# Altium schematic symbol library Schematic_Libraries.SchLib: 57 symbols
Pins are listed as number, name and electrical type; pins without a type are passive.

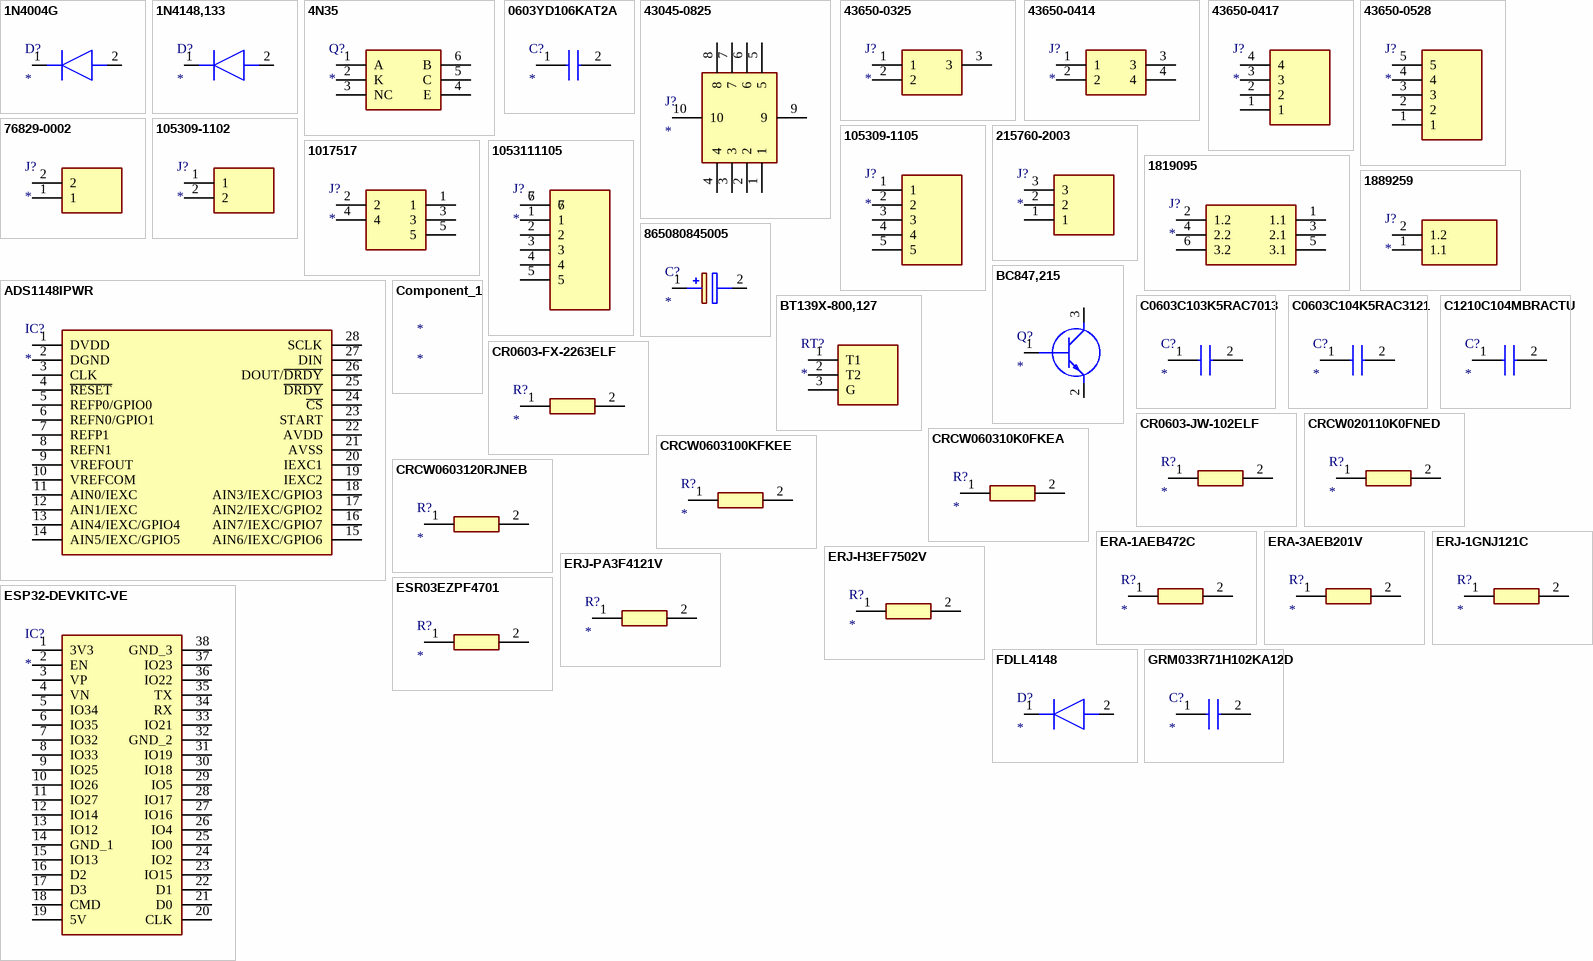
[diagram p0: symbols 1N4004G to GRM033R71H102KA12D]

## 1N4004G
designator D?
Diode; Manufacturer_Name: onsemi; Manufacturer_Part_Number: 1N4004G; Datasheet Link: https://www.onsemi.com/pub/Collateral/1N4001-D.PDF; Mouser Part Number: 863-1N4004G; Mouser Price/Stock: https://www.mouser.co.uk/ProductDetail/onsemi/1N4004G?qs=y2kkmE52mdNg%252Biqv0rMpBA%3D%3D; Arrow Part Number: 1N4004G; Arrow Price/Stock: https://www.arrow.com/en/products/1n4004g/on-semiconductor?region=europe
footprint DIOAD1405W86L465D235
pins: 1 K, 2 A

## 1N4148,133
designator D?
Diode; Manufacturer_Name: Nexperia; Manufacturer_Part_Number: 1N4148,133; Datasheet Link: https://assets.nexperia.com/documents/data-sheet/1N4148_1N4448.pdf; Mouser Part Number: 771-1N4148,133; Mouser Price/Stock: https://www.mouser.co.uk/ProductDetail/Nexperia/1N4148133?qs=elmhQ6eFu7hy8ApvpFxPZg%3D%3D; Arrow Part Number: 1N4148,133; Arrow Price/Stock: https://www.arrow.com/en/products/1n4148133/nxp-semiconductors
footprint DIOAD1165W56L425D185
pins: 1 K, 2 A

## 4N35
designator Q?
Transistor; Manufacturer_Name: Isocom; Manufacturer_Part_Number: 4N35; Datasheet Link: http://uk.rs-online.com/web/p/products/597302; Height: 4.5mm; Arrow Part Number: 4N35; Arrow Price/Stock: https://www.arrow.com/en/products/4n35/isocom?region=nac
footprint DIP762W50P254L712H450Q6N
pins: 1 A, 2 K, 3 NC, 4 E, 5 C, 6 B

## 0603YD106KAT2A
designator C?
Capacitor; Manufacturer_Name: Kyocera AVX; Manufacturer_Part_Number: 0603YD106KAT2A; Datasheet Link: https://www.mouser.at/datasheet/2/40/cx5r-776519.pdf; Height: 1.02mm; Mouser Part Number: 581-0603YD106KAT2A; Mouser Price/Stock: https://www.mouser.co.uk/ProductDetail/KYOCERA-AVX/0603YD106KAT2A?qs=%252BdQmOuGyFcHR%252BKJjw6cgxw%3D%3D
footprint CAPC1608X102N
pins: 1, 2

## 43045-0825
designator J?
Connector; Manufacturer_Name: Molex; Manufacturer_Part_Number: 43045-0825; Datasheet Link: https://www.molex.com/pdm_docs/sd/430450224_sd.pdf; Height: 9.91mm; Mouser Part Number: 538-43045-0825; Mouser Price/Stock: https://www.mouser.co.uk/ProductDetail/Molex/43045-0825?qs=s2x6KbZi%252BF4OgdQTNWCVlQ%3D%3D
footprint 43045-08YY_242526
pins: 1, 2, 3, 4, 5, 6, 7, 8, 9, 10

## 43650-0325
designator J?
Connector; Manufacturer_Name: Molex; Manufacturer_Part_Number: 43650-0325; Datasheet Link: https://www.molex.com/pdm_docs/sd/436500224_sd.pdf; Height: 9.9mm; Mouser Part Number: 538-43650-0325; Mouser Price/Stock: https://www.mouser.co.uk/ProductDetail/Molex/43650-0325?qs=o4r9IV%252BgZWMlLwul08NtEw%3D%3D
footprint 43650-03YY_242526
pins: 1, 2, 3

## 43650-0414
designator J?
Connector; Manufacturer_Name: Molex; Manufacturer_Part_Number: 43650-0414; Datasheet Link: https://www.molex.com/pdm_docs/sd/436500212_sd.pdf; Height: 5.57mm; Mouser Part Number: 538-43650-0414; Mouser Price/Stock: https://www.mouser.co.uk/ProductDetail/Molex/43650-0414?qs=R7%2FZKp6KZ2bFoNEw1nfqtQ%3D%3D
footprint 43650-04(12,13,14)
pins: 1, 2, 3, 4

## 43650-0417
designator J?
Connector; Manufacturer_Name: Molex; Manufacturer_Part_Number: 43650-0417; Datasheet Link: https://www.molex.com/pdm_docs/sd/436500215_sd.pdf; Height: 9.9mm; Mouser Part Number: 538-43650-0417; Mouser Price/Stock: https://www.mouser.co.uk/ProductDetail/Molex/43650-0417?qs=HSGlLeu24BPtyyP0ZyQMkg%3D%3D
footprint 43650-04YY_151617
pins: 1, 2, 3, 4

## 43650-0528
designator J?
Connector; Manufacturer_Name: Molex; Manufacturer_Part_Number: 43650-0528; Datasheet Link: https://www.molex.com/pdm_docs/sd/436500227_sd.pdf; Height: 9.9mm; Mouser Part Number: 538-43650-0528; Mouser Price/Stock: https://www.mouser.co.uk/ProductDetail/Molex/43650-0528?qs=jGANiKWBgcigkrrk7PUfPg%3D%3D
footprint 43650-05YY_272829
pins: 1, 2, 3, 4, 5

## 76829-0002
designator J?
Connector; Manufacturer_Name: Molex; Manufacturer_Part_Number: 76829-0002; Datasheet Link: https://www.molex.com/pdm_docs/sd/768290002_sd.pdf; Height: 14.8mm; Mouser Part Number: 538-76829-0002; Mouser Price/Stock: https://www.mouser.co.uk/ProductDetail/Molex/76829-0002?qs=KpdAywxU013zSYApMD1zRg%3D%3D
footprint 768290002
pins: 1, 2

## 105309-1102
designator J?
Connector; Manufacturer_Name: Molex; Manufacturer_Part_Number: 105309-1102; Datasheet Link: http://www.molex.com/pdm_docs/sd/1053091102_sd.pdf; Height: 10.51mm; Mouser Part Number: 538-105309-1102; Mouser Price/Stock: https://www.mouser.co.uk/ProductDetail/Molex/105309-1102?qs=5aG0NVq1C4zzTOxEjLJqtg%3D%3D
footprint 1053091102
pins: 1, 2

## 105309-1105
designator J?
Connector; Manufacturer_Name: Molex; Manufacturer_Part_Number: 105309-1105; Datasheet Link: https://componentsearchengine.com/Datasheets/1/105309-1105.pdf; Height: 10.71mm; Mouser Part Number: 538-105309-1105; Mouser Price/Stock: https://www.mouser.co.uk/ProductDetail/Molex/105309-1105?qs=5aG0NVq1C4xeVnIB0kAHNg%3D%3D
footprint 1053091105
pins: 1, 2, 3, 4, 5

## 215760-2003
designator J?
Connector; Manufacturer_Name: Molex; Manufacturer_Part_Number: 215760-2003; Datasheet Link: https://www.molex.com/pdm_docs/sd/2157601002_sd.pdf; Height: 5.87mm; Mouser Part Number: 538-215760-2003; Mouser Price/Stock: https://www.mouser.co.uk/ProductDetail/Molex/215760-2003?qs=pBJMDPsKWf09BQNa5vunHw%3D%3D
footprint 215760-YY03
pins: 1, 2, 3

## 1017517
designator J?
Connector; Manufacturer_Name: Phoenix Contact; Manufacturer_Part_Number: 1017517; Datasheet Link: http://www.phoenixcontact.com/de/produkte/1017517/pdf; Height: 23.6mm; Mouser Part Number: 651-1017517; Mouser Price/Stock: https://www.mouser.co.uk/ProductDetail/Phoenix-Contact/1017517?qs=F5EMLAvA7IBc9r3IKuJwsQ%3D%3D; Arrow Part Number: 1017517; Arrow Price/Stock: https://www.arrow.com/en/products/1017517/phoenix-contact?region=nac
footprint 1017517
pins: 1, 2, 3, 4, 5

## 1819095
designator J?
Connector; Manufacturer_Name: Phoenix Contact; Manufacturer_Part_Number: 1819095; Datasheet Link: http://www.phoenixcontact.com/gb/produkte/1819095; Height: 34.2mm; Mouser Part Number: 651-1819095; Mouser Price/Stock: https://www.mouser.co.uk/ProductDetail/Phoenix-Contact/1819095?qs=2WS7V4AoKFp%2FrLOug%252BjY6w%3D%3D; Arrow Part Number: 1819095; Arrow Price/Stock: https://www.arrow.com/en/products/1819095/phoenix-contact
footprint 1819095
pins: 1 1.1, 2 1.2, 3 2.1, 4 2.2, 5 3.1, 6 3.2

## 1889259
designator J?
Connector; Manufacturer_Name: Phoenix Contact; Manufacturer_Part_Number: 1889259; Datasheet Link: https://datasheet.datasheetarchive.com/originals/distributors/SFDatasheet-2/sf-00055982.pdf; Height: 12.9mm; Mouser Part Number: 651-1889259; Mouser Price/Stock: https://www.mouser.co.uk/ProductDetail/Phoenix-Contact/1889259?qs=DAHzmYU9cu0zVWy4jZehMg%3D%3D; Arrow Part Number: 1889259; Arrow Price/Stock: https://www.arrow.com/en/products/1889259/phoenix-contact?region=nac
footprint 1889259
pins: 1 1.1, 2 1.2

## 1053111105
designator J?
Connector; Manufacturer_Name: Molex; Manufacturer_Part_Number: 1053111105; Datasheet Link: https://www.molex.com/pdm_docs/sd/1053111102_sd.pdf; Height: 10.51mm
footprint 105311??05
pins: 1, 2, 3, 4, 5, 6, 7

## 865080845005
designator C?
Capacitor Polarised; Manufacturer_Name: Wurth Elektronik; Manufacturer_Part_Number: 865080845005; Datasheet Link: https://componentsearchengine.com/Datasheets/2/865080845005.pdf; Height: 7.7mm; Mouser Part Number: 710-865080845005; Mouser Price/Stock: https://www.mouser.co.uk/ProductDetail/Wurth-Elektronik/865080845005?qs=amGC7iS6iy8sIRVXlptWnA%3D%3D
footprint CAPAE660X770N
pins: 1 +, 2 -

## ADS1148IPWR
designator IC?
Integrated Circuit; Manufacturer_Name: Texas Instruments; Manufacturer_Part_Number: ADS1148IPWR; Datasheet Link: https://www.ti.com/lit/ds/symlink/ads1148.pdf?ts=1619426241250&ref_url=https%253A%252F%252Fwww.ti.com%252Fstore%252Fti%252Fen%252Fp%252Fproduct%252F%253Fp%253DADS1148IPWR; Height: 1.2mm; Mouser Part Number: 595-ADS1148IPWR; Mouser Price/Stock: https://www.mouser.co.uk/ProductDetail/Texas-Instruments/ADS1148IPWR?qs=J7dbQ%252BTwiys0xPZTIiVXvA%3D%3D; Arrow Part Number: ADS1148IPWR; Arrow Price/Stock: https://www.arrow.com/en/products/ads1148ipwr/texas-instruments
footprint SOP65P640X120-28N
pins: 1 DVDD, 2 DGND, 3 CLK, 4 ~{RESET}, 5 REFP0/GPIO0, 6 REFN0/GPIO1, 7 REFP1, 8 REFN1, 9 VREFOUT, 10 VREFCOM, 11 AIN0/IEXC, 12 AIN1/IEXC, 13 AIN4/IEXC/GPIO4, 14 AIN5/IEXC/GPIO5, 15 AIN6/IEXC/GPIO6, 16 AIN7/IEXC/GPIO7, 17 AIN2/IEXC/GPIO2, 18 AIN3/IEXC/GPIO3, 19 IEXC2, 20 IEXC1, 21 AVSS, 22 AVDD, 23 START, 24 ~{CS}, 25 ~{DRDY}, 26 DOUT/~{DRDY}, 27 DIN, 28 SCLK

## BC847,215
designator Q?
Transistor BJT NPN; Manufacturer_Name: Nexperia; Manufacturer_Part_Number: BC847,215; Datasheet Link: https://assets.nexperia.com/documents/data-sheet/BC847_SER.pdf; Height: 1.1mm; Mouser Part Number: 771-BC847215; Mouser Price/Stock: https://www.mouser.co.uk/ProductDetail/Nexperia/BC847215?qs=me8TqzrmIYWROhdFmDauyQ%3D%3D; Arrow Part Number: BC847,215; Arrow Price/Stock: https://www.arrow.com/en/products/bc847215/nexperia?region=europe
footprint BC847215
pins: 1 B, 2 E, 3 C

## BT139X-800,127
designator RT?
Thermistor; Manufacturer_Name: WeEn Semiconductors; Manufacturer_Part_Number: BT139X-800,127; Datasheet Link: https://www.mouser.co.uk/datasheet/2/848/BT139X-800-1104332.pdf; Height: 4.6mm; Mouser Part Number: 771-BT139X-800127; Mouser Price/Stock: https://www.mouser.co.uk/ProductDetail/WeEn-Semiconductors/BT139X-800127?qs=me8TqzrmIYUpGZ3R%252BN0ixA%3D%3D; Arrow Part Number: BT139X-800,127; Arrow Price/Stock: https://www.arrow.com/en/products/bt139x-800127/ween-semiconductors?utm_currency=USD&region=europe
footprint TO254P460X1000X1910-3P
pins: 1 T1, 2 T2, 3 G

## C0603C103K5RAC7013
designator C?
Capacitor; Manufacturer_Name: KEMET; Manufacturer_Part_Number: C0603C103K5RAC7013; Datasheet Link: https://www.mouser.es/datasheet/2/212/KEM_C1002_X7R_SMD-1102033.pdf; Height: 0.87mm; Mouser Part Number: 80-C0603C103K5RC7013; Mouser Price/Stock: https://www.mouser.co.uk/ProductDetail/KEMET/C0603C103K5RAC7013?qs=rxL5I1UrDR%2FDLdVRYcoJRw%3D%3D; Arrow Part Number: C0603C103K5RAC7013; Arrow Price/Stock: https://www.arrow.com/en/products/c0603c103k5rac7013/kemet-corporation
footprint CAPC1608X87N
pins: 1, 2

## C0603C104K5RAC3121
designator C?
Capacitor; Manufacturer_Name: KEMET; Manufacturer_Part_Number: C0603C104K5RAC3121; Datasheet Link: https://mouser.componentsearchengine.com/Datasheets/1/C0603C104K5RAC3121.pdf; Height: 0.95mm; Mouser Part Number: 80-C603C104K5RAC3121; Mouser Price/Stock: https://www.mouser.co.uk/ProductDetail/KEMET/C0603C104K5RAC3121?qs=oBCMsStVSxe1EkGyoyETtg%3D%3D; Arrow Part Number: C0603C104K5RAC3121; Arrow Price/Stock: https://www.arrow.com/en/products/c0603c104k5rac3121/kemet-corporation?region=nac
footprint CAPC1608X95N
pins: 1, 2

## C1210C104MBRACTU
designator C?
Capacitor; Manufacturer_Name: KEMET; Manufacturer_Part_Number: C1210C104MBRACTU; Datasheet Link: https://content.kemet.com/datasheets/KEM_C1010_X7R_HV_SMD.pdf; Mouser Part Number: 80-C1210C104MBR; Mouser Price/Stock: https://www.mouser.co.uk/ProductDetail/KEMET/C1210C104MBRACTU?qs=%2FukktrhNKsZSienwvzOPlQ%3D%3D; Arrow Part Number: C1210C104MBRACTU; Arrow Price/Stock: https://www.arrow.com/en/products/c1210c104mbractu/kemet-corporation?region=nac
footprint C1210
pins: 1, 2

## Component_1
designator *

## CR0603-FX-2263ELF
designator R?
Resistor; Manufacturer_Name: Bourns; Manufacturer_Part_Number: CR0603-FX-2263ELF; Datasheet Link: https://www.bourns.com/pdfs/chpreztr.pdf; Height: 0.55mm; Mouser Part Number: 652-CR0603FX-2263ELF; Mouser Price/Stock: https://www.mouser.co.uk/ProductDetail/Bourns/CR0603-FX-2263ELF?qs=zx2075yZkZKb3bFqHcdfsQ%3D%3D
footprint RESC1608X55N
pins: 1, 2

## CR0603-JW-102ELF
designator R?
Resistor; Manufacturer_Name: Bourns; Manufacturer_Part_Number: CR0603-JW-102ELF; Datasheet Link: https://www.bourns.com/pdfs/chpreztr.pdf; Height: 0.55mm; Mouser Part Number: 652-CR0603-JW-102ELF; Mouser Price/Stock: https://www.mouser.co.uk/ProductDetail/Bourns/CR0603-JW-102ELF?qs=rcPhh2wube3o3zlmFZCUPg%3D%3D; Arrow Part Number: CR0603-JW-102ELF; Arrow Price/Stock: https://www.arrow.com/en/products/cr0603-jw-102elf/bourns?region=nac
footprint RESC1608X55N
pins: 1, 2

## CRCW020110K0FNED
designator R?
Resistor; Manufacturer_Name: Vishay; Manufacturer_Part_Number: CRCW020110K0FNED; Datasheet Link: http://www.vishay.com/docs/20035/dcrcwe3.pdf; Height: 0.28mm; Mouser Part Number: 71-CRCW0201-10K; Mouser Price/Stock: https://www.mouser.co.uk/ProductDetail/Vishay-Dale/CRCW020110K0FNED?qs=IQLUlsvFoXuh7T4rhkKYcQ%3D%3D; Arrow Part Number: CRCW020110K0FNED; Arrow Price/Stock: https://www.arrow.com/en/products/crcw020110k0fned/vishay?utm_currency=USD&region=nac
footprint RESC0603X28N
pins: 1, 2

## CRCW060310K0FKEA
designator R?
Resistor; Manufacturer_Name: Vishay; Manufacturer_Part_Number: CRCW060310K0FKEA; Datasheet Link: http://www.vishay.com/docs/20035/dcrcwe3.pdf; Height: 0.5mm; Mouser Part Number: 71-CRCW0603-10K-E3; Mouser Price/Stock: https://www.mouser.co.uk/ProductDetail/Vishay-Dale/CRCW060310K0FKEA?qs=pAO1Z172M84BVnhDjtnsoQ%3D%3D; Arrow Part Number: CRCW060310K0FKEA; Arrow Price/Stock: https://www.arrow.com/en/products/crcw060310k0fkea/vishay?region=nac
footprint RESC1608X50N
pins: 1, 2

## CRCW0603100KFKEE
designator R?
Resistor; Manufacturer_Name: Vishay; Manufacturer_Part_Number: CRCW0603100KFKEE; Datasheet Link: http://www.vishay.com/docs/20035/dcrcwe3.pdf; Height: 0.5mm; Mouser Part Number: 71-CRCW0603100KFKEE; Mouser Price/Stock: https://www.mouser.co.uk/ProductDetail/Vishay-Dale/CRCW0603100KFKEE?qs=%252B6g0mu59x7I1D%252BO0qMg%252Bjg%3D%3D; Arrow Part Number: CRCW0603100KFKEE; Arrow Price/Stock: https://www.arrow.com/en/products/crcw0603100kfkee/vishay?utm_currency=USD&region=nac
footprint RESC1608X50N
pins: 1, 2

## CRCW0603120RJNEB
designator R?
Resistor; Manufacturer_Name: Vishay; Manufacturer_Part_Number: CRCW0603120RJNEB; Datasheet Link: http://www.vishay.com/docs/20035/dcrcwe3.pdf; Height: 0.5mm; Mouser Part Number: 71-CRCW0603120RJNEB; Mouser Price/Stock: https://www.mouser.co.uk/ProductDetail/Vishay-Dale/CRCW0603120RJNEB?qs=dDPdN3Fizmtr%252Bd8kOFNKdA%3D%3D; Arrow Part Number: CRCW0603120RJNEB; Arrow Price/Stock: https://www.arrow.com/en/products/crcw0603120rjneb/vishay?region=nac
footprint RESC1608X50N
pins: 1, 2

## ERA-1AEB472C
designator R?
Resistor; Manufacturer_Name: Panasonic; Manufacturer_Part_Number: ERA-1AEB472C; Datasheet Link: http://industrial.panasonic.com/cdbs/www-data/pdf/RDM0000/AOA0000C307.pdf; Height: 0.26mm; Mouser Part Number: 667-ERA-1AEB472C; Mouser Price/Stock: https://www.mouser.co.uk/ProductDetail/Panasonic/ERA-1AEB472C?qs=kmv%2FWw32SUOyPB5pGQQEuA%3D%3D; Arrow Part Number: ERA-1AEB472C; Arrow Price/Stock: https://www.arrow.com/en/products/era-1aeb472c/panasonic
footprint ERA1A_(0201)
pins: 1, 2

## ERA-3AEB201V
designator R?
Resistor; Manufacturer_Name: Panasonic; Manufacturer_Part_Number: ERA-3AEB201V; Datasheet Link: https://industrial.panasonic.com/cdbs/www-data/pdf/RDM0000/AOA0000C307.pdf; Height: 0.55mm; Mouser Part Number: 667-ERA-3AEB201V; Mouser Price/Stock: https://www.mouser.co.uk/ProductDetail/Panasonic/ERA-3AEB201V?qs=XhO1W%252B5LdJ8wKRfVTWbMaA%3D%3D; Arrow Part Number: ERA-3AEB201V; Arrow Price/Stock: https://www.arrow.com/en/products/era-3aeb201v/panasonic
footprint ERA3AEB101V
pins: 1, 2

## ERJ-1GNJ121C
designator R?
Resistor; Manufacturer_Name: Panasonic; Manufacturer_Part_Number: ERJ-1GNJ121C; Datasheet Link: https://industrial.panasonic.com/cdbs/www-data/pdf/RDA0000/AOA0000C301.pdf; Height: 0.26mm; Mouser Part Number: 667-ERJ-1GNJ121C; Mouser Price/Stock: https://www.mouser.com/Search/Refine.aspx?Keyword=667-ERJ-1GNJ121C
footprint ERJ1G_(0201)
pins: 1, 2

## ERJ-H3EF7502V
designator R?
Resistor; Manufacturer_Name: Panasonic; Manufacturer_Part_Number: ERJ-H3EF7502V; Datasheet Link: http://industrial.panasonic.com/cdbs/www-data/pdf/RDQ0000/ast-ind-151033.pdf
footprint ERJH3
pins: 1, 2

## ERJ-PA3F4121V
designator R?
Resistor; Manufacturer_Name: Panasonic; Manufacturer_Part_Number: ERJ-PA3F4121V; Datasheet Link: https://industrial.panasonic.com/cdbs/www-data/pdf/RDO0000/AOA0000C331.pdf; Height: 0.55mm; Mouser Part Number: 667-ERJ-PA3F4121V; Mouser Price/Stock: https://www.mouser.com/Search/Refine.aspx?Keyword=667-ERJ-PA3F4121V
footprint ERJP03_PA3_(0603)
pins: 1, 2

## ESP32-DEVKITC-VE
designator IC?
Integrated Circuit; Manufacturer_Name: Espressif Systems; Manufacturer_Part_Number: ESP32-DEVKITC-VE; Datasheet Link: https://docs.espressif.com/projects/esp-idf/en/latest/esp32/hw-reference/esp32/get-started-devkitc.html; Height: 5mm; Mouser Part Number: 356-ESP32-DEVKTC32VE; Mouser Price/Stock: https://www.mouser.co.uk/ProductDetail/Espressif-Systems/ESP32-DevKitC-VE?qs=vmHwEFxEFR%252BnPxzX%2FBK62A%3D%3D
footprint ESP32DEVKITCVE
pins: 1 3V3, 2 EN, 3 VP, 4 VN, 5 IO34, 6 IO35, 7 IO32, 8 IO33, 9 IO25, 10 IO26, 11 IO27, 12 IO14, 13 IO12, 14 GND_1, 15 IO13, 16 D2, 17 D3, 18 CMD, 19 5V, 20 CLK, 21 D0, 22 D1, 23 IO15, 24 IO2, 25 IO0, 26 IO4, 27 IO16, 28 IO17, 29 IO5, 30 IO18, 31 IO19, 32 GND_2, 33 IO21, 34 RX, 35 TX, 36 IO22, 37 IO23, 38 GND_3

## ESR03EZPF4701
designator R?
Resistor; Manufacturer_Name: ROHM Semiconductor; Manufacturer_Part_Number: ESR03EZPF4701; Datasheet Link: http://uk.rs-online.com/web/p/products/1674382; Height: 0.55mm; Mouser Part Number: 755-ESR03EZPF4701; Mouser Price/Stock: https://www.mouser.co.uk/ProductDetail/ROHM-Semiconductor/ESR03EZPF4701?qs=493kPxzlxfL2NnaeJoZB2Q%3D%3D
footprint RESC1608X55N
pins: 1, 2

## FDLL4148
designator D?
Diode; Manufacturer_Name: onsemi; Manufacturer_Part_Number: FDLL4148; Datasheet Link: https://www.onsemi.com/pub/Collateral/1N914-D.PDF; Height: 1mm; Mouser Part Number: 512-FDLL4148; Mouser Price/Stock: https://www.mouser.co.uk/ProductDetail/onsemi-Fairchild/FDLL4148?qs=GXJjH%252BIVz3Nb7%252BJnJig0Zw%3D%3D; Arrow Part Number: FDLL4148; Arrow Price/Stock: https://www.arrow.com/en/products/fdll4148/on-semiconductor?utm_currency=USD&region=europe
footprint FDLL4448
pins: 1 K, 2 A

## GRM033R71H102KA12D
designator C?
Capacitor; Manufacturer_Name: Murata Electronics; Manufacturer_Part_Number: GRM033R71H102KA12D; Datasheet Link: https://search.murata.co.jp/Ceramy/image/img/A01X/G101/ENG/GRM033R71H102KA12-01A.pdf; Height: 0.33mm; Mouser Part Number: 81-GRM033R71H102KA2D; Mouser Price/Stock: https://www.mouser.co.uk/ProductDetail/Murata-Electronics/GRM033R71H102KA12D?qs=2W5sgKM%2F373OnvLttcxBWw%3D%3D; Arrow Part Number: GRM033R71H102KA12D; Arrow Price/Stock: https://www.arrow.com/en/products/grm033r71h102ka12d/murata-manufacturing?region=nac
footprint CAPC0603X33N
pins: 1, 2

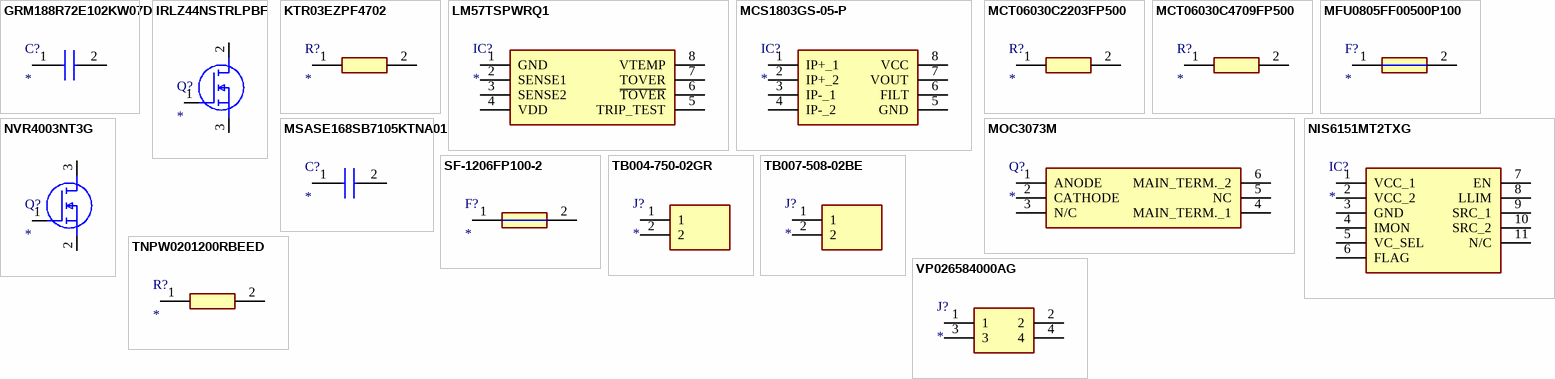
[diagram p1: symbols GRM188R72E102KW07D to VP026584000AG]

## GRM188R72E102KW07D
designator C?
Capacitor; Manufacturer_Name: Murata Electronics; Manufacturer_Part_Number: GRM188R72E102KW07D; Datasheet Link: https://search.murata.co.jp/Ceramy/image/img/A01X/G101/ENG/GRM188R72E102KW07-00B.pdf; Height: 0.9mm; Mouser Part Number: 81-GRM18R72E102KW07D; Mouser Price/Stock: https://www.mouser.co.uk/ProductDetail/Murata-Electronics/GRM188R72E102KW07D?qs=0EDxBdtd5TTqBbAL3ZuZjw%3D%3D; Arrow Part Number: GRM188R72E102KW07D; Arrow Price/Stock: https://www.arrow.com/en/products/grm188r72e102kw07d/murata-manufacturing
footprint CAPC1608X90N
pins: 1, 2

## IRLZ44NSTRLPBF
designator Q?
MOSFET (N-Channel); Manufacturer_Name: Infineon; Manufacturer_Part_Number: IRLZ44NSTRLPBF; Datasheet Link: https://www.infineon.com/dgdl/irlz44nspbf.pdf?fileId=5546d462533600a40153567221272727; Height: 4.83mm; Mouser Part Number: 942-IRLZ44NSTRLPBF; Mouser Price/Stock: https://www.mouser.co.uk/ProductDetail/Infineon-Technologies/IRLZ44NSTRLPBF?qs=9%252BKlkBgLFf1LijFJvUznEg%3D%3D; Arrow Part Number: IRLZ44NSTRLPBF; Arrow Price/Stock: https://www.arrow.com/en/products/irlz44nstrlpbf/infineon-technologies-ag?utm_currency=USD&region=nac
footprint IRF2804STRLPBF
pins: 1 G, 2 D, 3 S

## KTR03EZPF4702
designator R?
Resistor; Manufacturer_Name: ROHM Semiconductor; Manufacturer_Part_Number: KTR03EZPF4702; Datasheet Link: http://rohmfs.rohm.com/en/products/databook/datasheet/passive/resistor/chip_resistor/ktr.pdf; Height: 0.55mm; Mouser Part Number: 755-KTR03EZPF4702; Mouser Price/Stock: https://www.mouser.com/Search/Refine.aspx?Keyword=755-KTR03EZPF4702
footprint RESC1608X55N
pins: 1, 2

## LM57TSPWRQ1
designator IC?
Integrated Circuit; Manufacturer_Name: Texas Instruments; Manufacturer_Part_Number: LM57TSPWRQ1; Datasheet Link: https://www.ti.com/lit/ds/symlink/lm57-q1.pdf?HQS=dis-dk-null-digikeymode-dsf-pf-null-wwe&ts=1648961045993&ref_url=https%253A%252F%252Fwww.ti.com%252Fgeneral%252Fdocs%252Fsuppproductinfo.tsp%253FdistId%253D10%2526gotoUrl%253Dhttps%253A%252F%252Fwww.ti.com; Height: 1.2mm
footprint SOP65P640X120-8N
pins: 1 GND, 2 SENSE1, 3 SENSE2, 4 VDD, 5 TRIP_TEST, 6 ~{TOVER}, 7 TOVER, 8 VTEMP

## MCS1803GS-05-P
designator IC?
Integrated Circuit; Manufacturer_Name: Monolithic Power Systems (MPS); Manufacturer_Part_Number: MCS1803GS-05-P; Datasheet Link: https://www.monolithicpower.com/en/documentview/productdocument/index/version/2/document_type/Datasheet/lang/en/sku/MCS1803GS/document_id/5067/; Height: 1.75mm; Mouser Part Number: 946-MCS1803GS-05-P; Mouser Price/Stock: https://www.mouser.co.uk/ProductDetail/Monolithic-Power-Systems-MPS/MCS1803GS-05-P?qs=GedFDFLaBXFKS0RaHM78Vw%3D%3D
footprint SOIC127P600X175-8N
pins: 1 IP+_1, 2 IP+_2, 3 IP-_1, 4 IP-_2, 5 GND, 6 FILT, 7 VOUT, 8 VCC

## MCT06030C2203FP500
designator R?
Resistor; Manufacturer_Name: Vishay; Manufacturer_Part_Number: MCT06030C2203FP500; Datasheet Link: http://www.vishay.com/docs/28705/mcx0x0xpro.pdf; Height: 0.55mm; Mouser Part Number: 594-MCT06030C2203FP5; Mouser Price/Stock: https://www.mouser.co.uk/ProductDetail/Vishay-Beyschlag/MCT06030C2203FP500?qs=sIxod1zg5hFqr3QuK7fi7g%3D%3D; Arrow Part Number: MCT06030C2203FP500; Arrow Price/Stock: https://www.arrow.com/en/products/mct06030c2203fp500/vishay?region=nac
footprint RESC1608X55N
pins: 1, 2

## MCT06030C4709FP500
designator R?
Resistor; Manufacturer_Name: Vishay; Manufacturer_Part_Number: MCT06030C4709FP500; Datasheet Link: http://www.vishay.com/docs/28705/mcx0x0xpro.pdf; Height: 0.55mm; Mouser Part Number: 594-MCT06030C4709FP5; Mouser Price/Stock: https://www.mouser.co.uk/ProductDetail/Vishay-Beyschlag/MCT06030C4709FP500?qs=Vqeyrh6s%2FtGOVFMn1BdPQw%3D%3D
footprint RESC1608X55N
pins: 1, 2

## MFU0805FF00500P100
designator F?
Fuse; Manufacturer_Name: Vishay; Manufacturer_Part_Number: MFU0805FF00500P100; Datasheet Link: https://componentsearchengine.com/Datasheets/2/MFU0805FF00500P100.pdf; Height: 0.55mm; Mouser Part Number: 594-MFU0805FF00500P1; Mouser Price/Stock: https://www.mouser.co.uk/ProductDetail/Vishay-Beyschlag/MFU0805FF00500P100?qs=oI046glRuru%2F1tLHYz8V8Q%3D%3D; Arrow Part Number: MFU0805FF00500P100; Arrow Price/Stock: https://www.arrow.com/en/products/mfu0805ff00500p100/vishay?region=nac
footprint FUSC2012X55N
pins: 1, 2

## MOC3073M
designator Q?
Phototransistor; Manufacturer_Name: onsemi; Manufacturer_Part_Number: MOC3073M; Datasheet Link: https://www.onsemi.com/pub/Collateral/MOC3072M-D.PDF; Height: 5.08mm; Mouser Part Number: 863-MOC3073M; Mouser Price/Stock: https://www.mouser.co.uk/ProductDetail/onsemi/MOC3073M?qs=y6ZabgHbY%252Byfe0V2Rxk3CA%3D%3D; Arrow Part Number: MOC3073M; Arrow Price/Stock: https://www.arrow.com/en/products/moc3073m/on-semiconductor
footprint DIP762W51P254L851H508Q6N
pins: 1 ANODE, 2 CATHODE, 3 N/C, 4 MAIN_TERM._1, 5 NC, 6 MAIN_TERM._2

## MSASE168SB7105KTNA01
designator C?
Capacitor; Manufacturer_Name: TAIYO YUDEN; Manufacturer_Part_Number: MSASE168SB7105KTNA01; Datasheet Link: https://ds.yuden.co.jp/TYCOMPAS/or/specSheet?pn=MSASE168SB7105KTNA01; Height: 0.9mm; Mouser Part Number: 963-MSASE168SB7105KT; Mouser Price/Stock: https://www.mouser.co.uk/ProductDetail/TAIYO-YUDEN/MSASE168SB7105KTNA01?qs=tlsG%2FOw5FFh5ATmmYVDecQ%3D%3D
footprint CAPC1608X90N
pins: 1, 2

## NIS6151MT2TXG
designator IC?
Integrated Circuit; Manufacturer_Name: onsemi; Manufacturer_Part_Number: NIS6151MT2TXG; Datasheet Link: https://au.mouser.com/datasheet/2/308/1/NIS6151_D-2317813.pdf; Height: 0.8mm; Mouser Part Number: 863-NIS6151MT2TXG; Mouser Price/Stock: https://www.mouser.co.uk/ProductDetail/onsemi/NIS6151MT2TXG?qs=GedFDFLaBXG49rshI9HBNA%3D%3D
footprint NIS6151MT2TXG
pins: 1 VCC_1, 2 VCC_2, 3 GND, 4 IMON, 5 VC_SEL, 6 FLAG, 7 EN, 8 LLIM, 9 SRC_1, 10 SRC_2, 11 N/C

## NVR4003NT3G
designator Q?
MOSFET (N-Channel); Manufacturer_Name: onsemi; Manufacturer_Part_Number: NVR4003NT3G; Datasheet Link: https://www.onsemi.com/pub/Collateral/NTR4003N-D.PDF; Height: 1.11mm; Mouser Part Number: 863-NVR4003NT3G; Mouser Price/Stock: https://www.mouser.co.uk/ProductDetail/onsemi/NVR4003NT3G?qs=3PKVEWFFm28eDxDv809Sag%3D%3D; Arrow Part Number: NVR4003NT3G; Arrow Price/Stock: https://www.arrow.com/en/products/nvr4003nt3g/on-semiconductor?region=nac
footprint SOT96P237X111-3N
pins: 1 G, 2 S, 3 D

## SF-1206FP100-2
designator F?
Fuse; Manufacturer_Name: Bourns; Manufacturer_Part_Number: SF-1206FP100-2; Description: BOURNS - SF-1206FP100-2 - FUSE; Datasheet Link: https://componentsearchengine.com/Datasheets/2/SF-1206FP100-2.pdf; Height: 0.7mm; Mouser Part Number: 652-SF-1206FP100-2; Mouser Price/Stock: https://www.mouser.co.uk/ProductDetail/Bourns/SF-1206FP100-2?qs=YCa%2FAAYMW01LrxIsqa7bRw%3D%3D; Arrow Part Number: SF-1206FP100-2; Arrow Price/Stock: https://www.arrow.com/en/products/sf-1206fp100-2/bourns
footprint FUSC3116X70N
pins: 1, 2

## TB004-750-02GR
designator J?
Connector; Manufacturer_Name: Same Sky; Manufacturer_Part_Number: TB004-750-02GR; Datasheet Link: https://www.sameskydevices.com/product/resource/tb004-750.pdf?srsltid=AfmBOoqxp3TGb86M5ULA4E0wzZ60u_8h9TMDVLcLcvBMs9Tl5jQU3eIt; Height: 14.5mm; Mouser Part Number: 179-TB004-750-02GR; Mouser Price/Stock: https://www.mouser.co.uk/ProductDetail/Same-Sky/TB004-750-02GR?qs=%252BXxaIXUDbq2vyEQ2cptGkg%3D%3D
footprint TB00475002GR
pins: 1, 2

## TB007-508-02BE
designator J?
Connector; Manufacturer_Name: Same Sky; Manufacturer_Part_Number: TB007-508-02BE; Datasheet Link: https://www.sameskydevices.com/product/resource/supplyframepdf/tb007-508.pdf; Height: 14mm; Mouser Part Number: 490-TB007-508-02BE; Mouser Price/Stock: https://www.mouser.co.uk/ProductDetail/Same-Sky/TB007-508-02BE?qs=vLWxofP3U2y6PFKAfCqKUQ%3D%3D; Arrow Part Number: TB007-508-02BE; Arrow Price/Stock: https://www.arrow.com/en/products/tb007-508-02be/cui-devices?utm_currency=USD&region=nac
footprint TB00750802BE
pins: 1, 2

## TNPW0201200RBEED
designator R?
Resistor; Manufacturer_Name: Vishay; Manufacturer_Part_Number: TNPW0201200RBEED; Datasheet Link: https://www.vishay.com/docs/28758/tnpw_e3.pdf; Height: 0.26mm; Mouser Part Number: 71-TNPW0201200RBEED; Mouser Price/Stock: https://www.mouser.co.uk/ProductDetail/Vishay/TNPW0201200RBEED?qs=XAiT9M5g4x9vjxFxrjed7Q%3D%3D
footprint RESC0603X26N
pins: 1, 2

## VP026584000AG
designator J?
Connector; Manufacturer_Name: Amphenol; Manufacturer_Part_Number: VP026584000AG; Datasheet Link: http://www.anytek.com.tw/UserUpFiles/20181025/d41_CP3hmn_a.pdf; Height: 28.5mm; Mouser Part Number: 523-VP026584000AG; Mouser Price/Stock: https://www.mouser.co.uk/ProductDetail/Amphenol-Anytek/VP026584000AG?qs=T3oQrply3y8ZXElTBVt2Rg%3D%3D
footprint SHDR4W100P1016_2X2_2032X1830X2850P
pins: 1, 2, 3, 4